# EAGLE library part TPS2116DRLR (library astra)
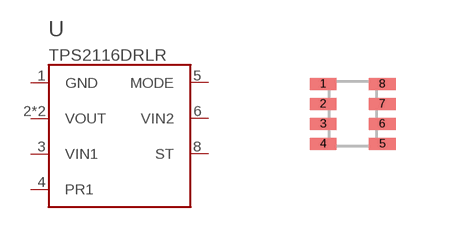
[diagram p3: symbol with the pads of TI_DRL8_MUX; footprint TI_DRL8_MUX]

Designator prefix U

## TPS2116DRLR  [TI_DRL8_MUX]
1  GND  pwr
2  VOUT  out
3  VIN1  pwr
4  PR1  in
5  MODE  in
6  VIN2  pwr
7  VOUT  out
8  ST  oc

## Footprint TI_DRL8_MUX (pad centres in mm)
TI TPS2116 DRL0008A, board layout example 4224486/G p23. https://www.ti.com/lit/ds/symlink/tps2116.pdf
smd 0.67 x 0.3: 1 -0.74,0.75; 2 -0.74,0.25; 3 -0.74,-0.25; 4 -0.74,-0.75; 5 0.74,-0.75; 6 0.74,-0.25; 7 0.74,0.25; 8 0.74,0.75